# EAGLE library part CON_HEADER_1X10 (library dp_devices.v6)
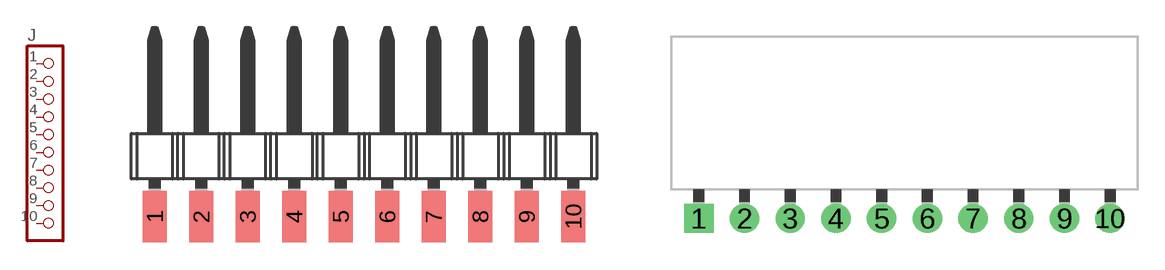
[diagram p149: symbol with the pads of M1X10_MALE_RIGHT_ANGLED_SMD; footprints M1X10_MALE_RIGHT_ANGLED_SMD, M1X10_FEMALE_RIGHT_ANGLED_PTH]

Designator prefix J

## CON_HEADER_1X10-_RIGHTANGLED_SMD  [M1X10_MALE_RIGHT_ANGLED_SMD]
1  1  pas
2  2  pas
3  3  pas
4  4  pas
5  5  pas
6  6  pas
7  7  pas
8  8  pas
9  9  pas
10  10  pas

## CON_HEADER_1X10-RIGHT_ANGLED_PTH  [M1X10_FEMALE_RIGHT_ANGLED_PTH]
Pads as for M1X10_MALE_RIGHT_ANGLED_SMD

## CON_HEADER_1X10-PTH  [M1X10]
Pads as for M1X10_MALE_RIGHT_ANGLED_SMD

## CON_HEADER_1X10-RIGHT_ANGLED_PTH_SHROUDED  [M1X10_MALE_RIGHT_ANGLES_PTH_SHROUDED]
Pads as for M1X10_MALE_RIGHT_ANGLED_SMD

## Footprint M1X10_MALE_RIGHT_ANGLED_SMD (pad centres in mm)
1x10 Right angled male header SMD Mfr no: 961110-5500 961110-5500 <http://www.digikey.com/product-detail/en/961110-5500-AR-TP/961110-5500-AR-TP-ND/2072452>
smd 1.3 x 2.8: 1 -11.43,-3.3; 2 -8.89,-3.3; 3 -6.35,-3.3; 4 -3.81,-3.3; 5 -1.27,-3.3; 6 1.27,-3.3; 7 3.81,-3.3; 8 6.35,-3.3; 9 8.89,-3.3; 10 11.43,-3.3

## Footprint M1X10_FEMALE_RIGHT_ANGLED_PTH (pad centres in mm)
1x10 Right angled female header PTH Mfr no: PPPC101LGBN-RC
drill 1.02 pad 1.632 square: 1 -11.43,-5.85
drill 1.02 pad 1.632: 2 -8.89,-5.85; 3 -6.35,-5.85; 4 -3.81,-5.85; 5 -1.27,-5.85; 6 1.27,-5.85; 7 3.81,-5.85; 8 6.35,-5.85; 9 8.89,-5.85; 10 11.43,-5.85

## Footprint M1X10 (pad centres in mm)
drill 1.02 pad 1.632 square: 1 -11.43,0
drill 1.02 pad 1.632: 2 -8.89,0; 3 -6.35,0; 4 -3.81,0; 5 -1.27,0; 6 1.27,0; 7 3.81,0; 8 6.35,0; 9 8.89,0; 10 11.43,0

## Footprint M1X10_MALE_RIGHT_ANGLES_PTH_SHROUDED (pad centres in mm)
Molex PN: 70553-0044 Distance from edge to center: 6.795 mm
drill 1.09 square: 1 -11.43,-6.415
drill 1.09: 2 -8.89,-6.415; 3 -6.35,-6.415; 4 -3.81,-6.415; 5 -1.27,-6.415; 6 1.27,-6.415; 7 3.81,-6.415; 8 6.35,-6.415; 9 8.89,-6.415; 10 11.43,-6.415